# Altium schematic symbol library IM73A135.SchLib: 1 symbol
Pins are listed as number, name and electrical type; pins without a type are passive.

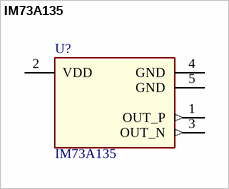
[diagram p0: symbol IM73A135]

## IM73A135
designator U?
Dust and Water Resistant Analog XENSIV MEMS Microphone; Multiple Parts: No; Alternate View: Yes; Symbol Type: Dust and Water Resistant Analog XENSIV MEMS Microphone
pins: 1 OUT_P (out) "Differential Output +", 2 VDD (power) "Power supply", 3 OUT_N (out) "Differential Output -", 4 GND (power) "Ground", 5 GND (power) "Ground"